# Altium footprint library UCP.PcbLib: 222 footprints (part 6 of 14)
Each footprint in its own frame and in the unit in brackets; x right, y up, seen from the top. Pads: shape width x height; smd on the part's side, far side on the other; paste and mask are expansions set on the pad; w line width, h text height; cw(c..) or ccw(c..) is an arc to the next point about the centre after c.
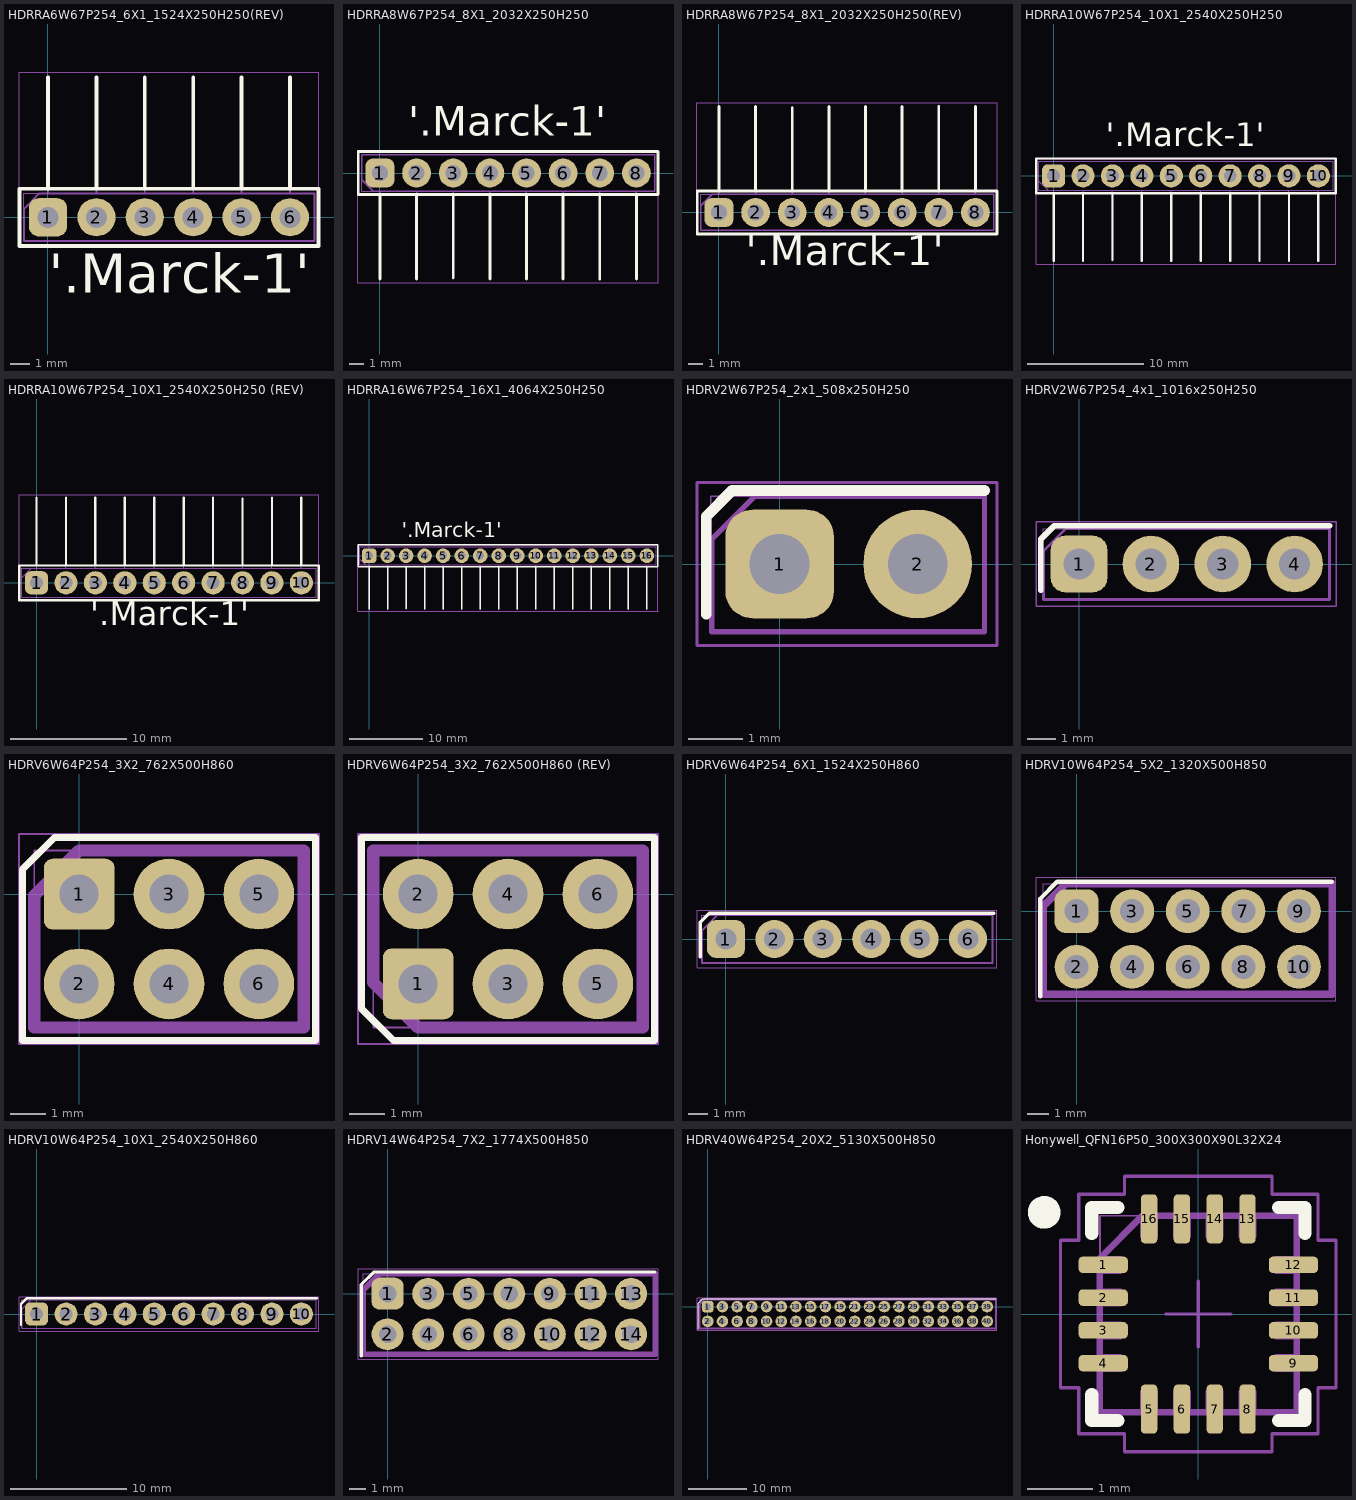
[diagram p5: the footprints below, top view; thin cyan lines are the x and y axes]

## HDRRA6W67P254_6X1_1524X250H250(REV) [mm] "Header, Right Angle Post, 2.54 mm pitch; 0.67 mm lead width, 6 pins, 1 row, 6 pins per row, 15.24 mm L X 2.50 mm W X 2.50 mm H body"
height 2.5
pads (6):
  rrect50% 2x2 hole 1.1: 1(0,0)
  round 2 hole 1.1: 2(2.54,0) 3(5.08,0) 4(7.62,0) 5(10.16,0) 6(12.7,0)
Top Overlay:
  lines w0.2: 0,1.55 0,7.35 ; 2.54,1.55 2.54,7.35 ; 5.08,1.55 5.08,7.35 ; 7.62,1.55 7.62,7.35 ; 10.16,1.55 10.16,7.35 ; 12.7,1.55 12.7,7.35 ; -1.5,-1.5 -1.5,1.5 14.2,1.5 14.2,-1.5 -1.5,-1.5
  text "'.Marck-1'" at 0.038,-4.651 h3.5
Top Designator:
  text ".Designator" at -4.511,-0.453 h2
Top Assembly:
  drawing of 17 lines, arcs and shapes, not listed
Top Courtyard:
  circle w0.05: c0,0 r0.25
  lines w0.05: -0.35,0 0.35,0 ; 0,-0.35 0,0.35 ; -1.52,-1.5 14.22,-1.5 14.22,7.62 -1.52,7.62 -1.52,-1.5
Top Component Outline:
  lines w0.025: -1.27,-1.25 13.97,-1.25 13.97,1.25 -1.27,1.25 -1.27,-1.25
Top Component Terminal:
  lines w0.025: -0.335,-0.335 0.335,-0.335 0.335,0.335 -0.335,0.335 -0.335,-0.335 ; 2.205,-0.335 2.875,-0.335 2.875,0.335 2.205,0.335 2.205,-0.335 ; 4.745,-0.335 5.415,-0.335 5.415,0.335 4.745,0.335 4.745,-0.335
3D body "HDRRA3W67P254_3X1_762X250H250_CF.step": height 5.45, standoff -3, extent 6.35,-1.27 13.97,7.35
3D body "HDRRA3W67P254_3X1_762X250H250_CF.step": height 5.45, standoff -3, extent -1.27,-1.27 6.35,7.35

## HDRRA8W67P254_8X1_2032X250H250 [mm] "Header, Right Angle Post, 2.54 mm pitch; 0.67 mm lead width, 10 pins, 1 row, 10 pins per row, 20.32mm L X 2.50 mm W X 2.50 mm H body"
height 2.5
pads (8):
  rrect50% 2x2 hole 1.1: 1(0,0)
  round 2 hole 1.1: 2(2.54,0) 3(5.08,0) 4(7.62,0) 5(10.16,0) 6(12.7,0) 7(15.24,0) 8(17.78,0)
Top Overlay:
  lines w0.2: 0,-7.35 0,-1.52 ; 2.54,-7.35 2.54,-1.5 ; 5.08,-7.25 5.08,-1.55 ; 7.62,-7.35 7.62,-1.55 ; 10.16,-7.35 10.16,-1.55 ; 12.7,-7.35 12.7,-1.55 ; 15.24,-7.35 15.24,-1.55 ; 17.78,-7.35 17.78,-1.55 ; -1.5,-1.5 -1.5,1.5 19.28,1.5 19.28,-1.5 -1.5,-1.5
  text "'.Marck-1'" at 1.958,1.904 h3.5
Top Designator:
  text ".Designator" at -4.511,-0.453 h2
Top Assembly:
  lines w0.1: 0,-7.35 0,-1.25 ; 2.54,-7.35 2.54,-1.25 ; 5.08,-7.35 5.08,-1.25 ; 7.62,-7.35 7.62,-1.25 ; 10.16,-7.35 10.16,-1.25 ; 12.7,-7.35 12.7,-1.25 ; 15.24,-7.35 15.24,-1.25 ; 17.78,-7.35 17.78,-1.25 ; -1.27,-0.455 -0.475,-1.25 19.05,-1.25 19.05,1.25 -1.27,1.25 -1.27,-0.455
Top Courtyard:
  circle w0.05: c0,0 r0.25
  lines w0.05: -0.35,0 0.35,0 ; 0,-0.35 0,0.35 ; -1.52,-7.62 -1.52,1.5 19.28,1.5 19.28,-7.62 -1.52,-7.62
Top Component Outline:
  lines w0.025: -1.27,-1.25 -1.27,1.25 19.05,1.25 19.05,-1.25 -1.27,-1.25
Top Component Terminal:
  lines w0.025: -0.335,-0.335 -0.335,0.335 0.335,0.335 0.335,-0.335 -0.335,-0.335 ; 2.205,-0.335 2.205,0.335 2.875,0.335 2.875,-0.335 2.205,-0.335 ; 4.745,-0.335 4.745,0.335 5.415,0.335 5.415,-0.335 4.745,-0.335 ; 7.285,-0.335 7.285,0.335 7.955,0.335 7.955,-0.335 7.285,-0.335 ; 9.825,-0.335 9.825,0.335 10.495,0.335 10.495,-0.335 9.825,-0.335 ; 12.365,-0.335 12.365,0.335 13.035,0.335 13.035,-0.335 12.365,-0.335 ; 14.905,-0.335 14.905,0.335 15.575,0.335 15.575,-0.335 14.905,-0.335 ; 17.445,-0.335 17.445,0.335 18.115,0.335 18.115,-0.335 17.445,-0.335
3D body "HDRRA8W64P254_8X1_2032X127H250.stp": height 5.45, standoff -3, extent -1.27,-7.37 19.05,1.25

## HDRRA8W67P254_8X1_2032X250H250(REV) [mm] "Header, Right Angle Post, 2.54 mm pitch; 0.67 mm lead width, 10 pins, 1 row, 10 pins per row, 20.32mm L X 2.50 mm W X 2.50 mm H body"
height 2.5
pads (8):
  rrect50% 2x2 hole 1.1: 1(0,0)
  round 2 hole 1.1: 2(2.54,0) 3(5.08,0) 4(7.62,0) 5(10.16,0) 6(12.7,0) 7(15.24,0) 8(17.78,0)
Top Overlay:
  lines w0.2: 0,1.52 0,7.35 ; 2.54,1.5 2.54,7.35 ; 5.08,1.55 5.08,7.25 ; 7.62,1.55 7.62,7.35 ; 10.16,1.55 10.16,7.35 ; 12.7,1.55 12.7,7.35 ; 15.24,1.55 15.24,7.35 ; 17.78,1.55 17.78,7.35 ; -1.5,-1.5 -1.5,1.5 19.28,1.5 19.28,-1.5 -1.5,-1.5
  text "'.Marck-1'" at 1.868,-4.366 h3.5
Top Designator:
  text ".Designator" at -4.511,-0.453 h2
Top Assembly:
  lines w0.1: 0,1.25 0,7.35 ; 2.54,1.25 2.54,7.35 ; 5.08,1.25 5.08,7.35 ; 7.62,1.25 7.62,7.35 ; 10.16,1.25 10.16,7.35 ; 12.7,1.25 12.7,7.35 ; 15.24,1.25 15.24,7.35 ; 17.78,1.25 17.78,7.35 ; -1.27,-1.25 -1.27,0.455 -0.475,1.25 19.05,1.25 19.05,-1.25 -1.27,-1.25
Top Courtyard:
  circle w0.05: c0,0 r0.25
  lines w0.05: -0.35,0 0.35,0 ; 0,-0.35 0,0.35 ; -1.52,-1.5 -1.52,7.62 19.28,7.62 19.28,-1.5 -1.52,-1.5
Top Component Outline:
  lines w0.025: -1.27,-1.25 19.05,-1.25 19.05,1.25 -1.27,1.25 -1.27,-1.25
Top Component Terminal:
  lines w0.025: -0.335,-0.335 0.335,-0.335 0.335,0.335 -0.335,0.335 -0.335,-0.335 ; 2.205,-0.335 2.875,-0.335 2.875,0.335 2.205,0.335 2.205,-0.335 ; 4.745,-0.335 5.415,-0.335 5.415,0.335 4.745,0.335 4.745,-0.335 ; 7.285,-0.335 7.955,-0.335 7.955,0.335 7.285,0.335 7.285,-0.335 ; 9.825,-0.335 10.495,-0.335 10.495,0.335 9.825,0.335 9.825,-0.335 ; 12.365,-0.335 13.035,-0.335 13.035,0.335 12.365,0.335 12.365,-0.335 ; 14.905,-0.335 15.575,-0.335 15.575,0.335 14.905,0.335 14.905,-0.335 ; 17.445,-0.335 18.115,-0.335 18.115,0.335 17.445,0.335 17.445,-0.335
3D body "HDRRA8W64P254_8X1_2032X127H250.stp": height 5.45, standoff -3, extent -1.27,-1.25 19.05,7.37

## HDRRA10W67P254_10X1_2540X250H250 [mm] "Header, Right Angle Post, 2.54 mm pitch; 0.67 mm lead width, 10 pins, 1 row, 10 pins per row, 25.4 mm L X 2.50 mm W X 2.50 mm H body"
height 2.5
pads (10):
  rrect50% 2x2 hole 1.1: 1(0,0)
  round 2 hole 1.1: 2(2.54,0) 3(5.08,0) 4(7.62,0) 5(10.16,0) 6(12.7,0) 7(15.24,0) 8(17.78,0) 9(20.32,0) 10(22.86,0)
Top Overlay:
  lines w0.2: 0,-7.35 0,-1.52 ; 2.54,-7.35 2.54,-1.5 ; 5.08,-7.25 5.08,-1.55 ; 7.62,-7.35 7.62,-1.55 ; 10.16,-7.35 10.16,-1.55 ; 12.7,-7.35 12.7,-1.55 ; 15.24,-7.35 15.24,-1.55 ; 17.78,-7.35 17.78,-1.55 ; 20.32,-7.35 20.32,-1.55 ; 22.86,-7.35 22.86,-1.55 ; -1.5,-1.5 24.36,-1.5 24.36,1.5 -1.5,1.5 -1.5,-1.5
  text "'.Marck-1'" at 4.513,1.854 h3.5
Top Designator:
  text ".Designator" at -4.511,-0.453 h2
Top Assembly:
  drawing of 25 lines, arcs and shapes, not listed
Top Courtyard:
  circle w0.05: c0,0 r0.25
  lines w0.05: -0.35,0 0.35,0 ; 0,-0.35 0,0.35 ; -1.52,-7.62 24.38,-7.62 24.38,1.5 -1.52,1.5 -1.52,-7.62
Top Component Outline:
  lines w0.025: -1.27,-1.25 24.13,-1.25 24.13,1.25 -1.27,1.25 -1.27,-1.25
Top Component Terminal:
  lines w0.025: -0.335,-0.335 0.335,-0.335 0.335,0.335 -0.335,0.335 -0.335,-0.335 ; 2.205,-0.335 2.875,-0.335 2.875,0.335 2.205,0.335 2.205,-0.335 ; 4.745,-0.335 5.415,-0.335 5.415,0.335 4.745,0.335 4.745,-0.335 ; 7.285,-0.335 7.955,-0.335 7.955,0.335 7.285,0.335 7.285,-0.335 ; 9.825,-0.335 10.495,-0.335 10.495,0.335 9.825,0.335 9.825,-0.335 ; 12.365,-0.335 13.035,-0.335 13.035,0.335 12.365,0.335 12.365,-0.335 ; 14.905,-0.335 15.575,-0.335 15.575,0.335 14.905,0.335 14.905,-0.335 ; 17.445,-0.335 18.115,-0.335 18.115,0.335 17.445,0.335 17.445,-0.335 ; 19.985,-0.335 20.655,-0.335 20.655,0.335 19.985,0.335 19.985,-0.335 ; 22.525,-0.335 23.195,-0.335 23.195,0.335 22.525,0.335 22.525,-0.335
3D body "DS1022-1x10R.stp": height 5.45, standoff -3, extent -1.27,-7.35 24.13,1.27

## HDRRA10W67P254_10X1_2540X250H250 (REV) [mm] "Header, Right Angle Post, 2.54 mm pitch; 0.67 mm lead width, 10 pins, 1 row, 10 pins per row, 25.4 mm L X 2.50 mm W X 2.50 mm H body"
height 2.5
pads (10):
  rrect50% 2x2 hole 1.1: 1(0,0)
  round 2 hole 1.1: 2(2.54,0) 3(5.08,0) 4(7.62,0) 5(10.16,0) 6(12.7,0) 7(15.24,0) 8(17.78,0) 9(20.32,0) 10(22.86,0)
Top Overlay:
  lines w0.2: 0,1.55 0,7.35 ; 2.54,1.55 2.54,7.35 ; 5.08,1.55 5.08,7.35 ; 7.62,1.55 7.62,7.35 ; 10.16,1.55 10.16,7.35 ; 12.7,1.55 12.7,7.35 ; 15.24,1.55 15.24,7.35 ; 17.78,1.55 17.78,7.25 ; 20.32,1.5 20.32,7.35 ; 22.86,1.52 22.86,7.35 ; -1.5,-1.5 24.36,-1.5 24.36,1.5 -1.5,1.5 -1.5,-1.5
  text "'.Marck-1'" at 4.638,-4.346 h3.5
Top Designator:
  text ".Designator" at -4.511,-0.453 h2
Top Assembly:
  drawing of 25 lines, arcs and shapes, not listed
Top Courtyard:
  circle w0.05: c0,0 r0.25
  lines w0.05: -0.35,0 0.35,0 ; 0,-0.35 0,0.35 ; -1.516,-1.525 -1.516,7.595 24.384,7.595 24.384,-1.525 -1.516,-1.525
Top Component Outline:
  lines w0.025: -1.27,-1.25 24.13,-1.25 24.13,1.25 -1.27,1.25 -1.27,-1.25
Top Component Terminal:
  lines w0.025: -0.335,-0.335 0.335,-0.335 0.335,0.335 -0.335,0.335 -0.335,-0.335 ; 2.205,-0.335 2.875,-0.335 2.875,0.335 2.205,0.335 2.205,-0.335 ; 4.745,-0.335 5.415,-0.335 5.415,0.335 4.745,0.335 4.745,-0.335 ; 7.285,-0.335 7.955,-0.335 7.955,0.335 7.285,0.335 7.285,-0.335 ; 9.825,-0.335 10.495,-0.335 10.495,0.335 9.825,0.335 9.825,-0.335 ; 12.365,-0.335 13.035,-0.335 13.035,0.335 12.365,0.335 12.365,-0.335 ; 14.905,-0.335 15.575,-0.335 15.575,0.335 14.905,0.335 14.905,-0.335 ; 17.445,-0.335 18.115,-0.335 18.115,0.335 17.445,0.335 17.445,-0.335 ; 19.985,-0.335 20.655,-0.335 20.655,0.335 19.985,0.335 19.985,-0.335 ; 22.525,-0.335 23.195,-0.335 23.195,0.335 22.525,0.335 22.525,-0.335
3D body "DS1022-1x10R.stp": height 5.45, standoff -3, extent -1.27,-1.27 24.13,7.35

## HDRRA16W67P254_16X1_4064X250H250 [mm] "Header, Right Angle Post, 2.54 mm pitch; 0.67 mm lead width, 16 pins, 1 row, 16 pins per row, 40.64 mm L X 2.50 mm W X 2.50 mm H body"
height 2.5
pads (16):
  rrect50% 2x2 hole 1.1: 1(0,0)
  round 2 hole 1.1: 2(2.54,0) 3(5.08,0) 4(7.62,0) 5(10.16,0) 6(12.7,0) 7(15.24,0) 8(17.78,0) 9(20.32,0) 10(22.86,0) 11(25.4,0) 12(27.94,0) 13(30.48,0) 14(33.02,0) 15(35.56,0) 16(38.1,0)
Top Overlay:
  lines w0.2: 0,-7.35 0,-1.52 ; 2.54,-7.35 2.54,-1.5 ; 5.08,-7.25 5.08,-1.55 ; 7.62,-7.35 7.62,-1.55 ; 10.16,-7.35 10.16,-1.55 ; 12.7,-7.35 12.7,-1.55 ; 15.24,-7.35 15.24,-1.55 ; 17.78,-7.35 17.78,-1.55 ; 20.32,-7.35 20.32,-1.55 ; 22.86,-7.35 22.86,-1.55 ; 25.4,-7.35 25.4,-1.55 ; 27.94,-7.35 27.94,-1.55 ; 30.48,-7.35 30.48,-1.55 ; 33.02,-7.35 33.02,-1.55 ; 35.56,-7.35 35.56,-1.55 ; 38.1,-7.35 38.1,-1.55 ; -1.5,-1.5 -1.5,1.5 39.6,1.5 39.6,-1.5 -1.5,-1.5
  text "'.Marck-1'" at 4.513,1.854 h3.5
Top Designator:
  text ".Designator" at -4.511,-0.453 h2
Top Assembly:
  lines w0.1: 0,-7.35 0,-1.25 ; 2.54,-7.35 2.54,-1.25 ; 5.08,-7.35 5.08,-1.25 ; 7.62,-7.35 7.62,-1.25 ; 10.16,-7.35 10.16,-1.25 ; 12.7,-7.35 12.7,-1.25 ; 15.24,-7.35 15.24,-1.25 ; 17.78,-7.35 17.78,-1.25 ; 20.32,-7.35 20.32,-1.25 ; 22.86,-7.35 22.86,-1.25 ; 25.4,-7.35 25.4,-1.25 ; 27.94,-7.35 27.94,-1.25 ; 30.48,-7.35 30.48,-1.25 ; 33.02,-7.35 33.02,-1.25 ; 35.56,-7.35 35.56,-1.25 ; 38.1,-7.35 38.1,-1.25 ; 39.37,-1.25 39.37,1.25 -1.27,1.25 -1.27,-0.455 -0.475,-1.25 39.375,-1.25
Top Courtyard:
  circle w0.05: c0,0 r0.25
  lines w0.05: -0.35,0 0.35,0 ; 0,-0.35 0,0.35 ; 39.62,-7.62 39.62,1.5 -1.52,1.5 -1.52,-7.62 39.625,-7.62
Top Component Outline:
  lines w0.025: 24.13,-1.25 -1.27,-1.25 -1.27,1.25 24.13,1.25 ; 39.37,-1.25 39.37,1.25
Top Component Terminal:
  lines w0.025: -0.335,-0.335 -0.335,0.335 0.335,0.335 0.335,-0.335 -0.335,-0.335 ; 2.205,-0.335 2.205,0.335 2.875,0.335 2.875,-0.335 2.205,-0.335 ; 4.745,-0.335 4.745,0.335 5.415,0.335 5.415,-0.335 4.745,-0.335 ; 7.285,-0.335 7.285,0.335 7.955,0.335 7.955,-0.335 7.285,-0.335 ; 9.825,-0.335 9.825,0.335 10.495,0.335 10.495,-0.335 9.825,-0.335 ; 12.365,-0.335 12.365,0.335 13.035,0.335 13.035,-0.335 12.365,-0.335 ; 14.905,-0.335 14.905,0.335 15.575,0.335 15.575,-0.335 14.905,-0.335 ; 17.445,-0.335 17.445,0.335 18.115,0.335 18.115,-0.335 17.445,-0.335 ; 19.985,-0.335 19.985,0.335 20.655,0.335 20.655,-0.335 19.985,-0.335 ; 22.525,-0.335 22.525,0.335 23.195,0.335 23.195,-0.335 22.525,-0.335
3D body "HDRRA16W64P254_16X1_4064X250H250.STEP.stp": height 5.45, standoff -3, extent -1.27,-7.35 39.37,1.27

## HDRV2W67P254_2x1_508x250H250 [mm] "Header, Vertical, 2.54 mm pitch; 0.64 mm lead width, 2 pins, 1 row, 2 pins per row, 5.08 mm L X 2.50 mm W X 8.60 mm H body"
height 8.6
pads (2):
  rrect50% 2x2 hole 1.1 paste-1.65: 1(0,0)
  round 2 hole 1.1 paste-1.65: 2(2.54,0)
Top Overlay:
  lines w0.2: -1.35,-0.925 -1.35,0.875 -0.875,1.35 3.77,1.35
Top Designator:
  text ".Designator" at -4.511,-0.453 h2
Top Assembly:
  lines w0.1: -1.25,-1.25 -1.25,0.455 -0.455,1.25 3.77,1.25 3.77,-1.25 -1.25,-1.25
Top Courtyard:
  circle w0.05: c0,0 r0.25
  lines w0.05: -0.35,0 0.35,0 ; 0,-0.35 0,0.35 ; -1.52,-1.5 -1.52,1.5 4,1.5 4,-1.5 -1.52,-1.5
Top Component Outline:
  lines w0.025: -1.27,-1.25 -1.27,1.25 3.77,1.25 3.77,-1.25 -1.27,-1.25
Top Component Terminal:
  lines w0.025: -0.32,-0.32 -0.32,0.32 0.32,0.32 0.32,-0.32 -0.32,-0.32 ; 2.22,-0.32 2.22,0.32 2.86,0.32 2.86,-0.32 2.22,-0.32
3D body "HDRV2W64P254_2X1_508X254H860.STEP": height 8.6, standoff -3, extent -1.25,-1.25 3.79,1.25

## HDRV2W67P254_4x1_1016x250H250 [mm] "Header, Vertical, 2.54 mm pitch; 0.64 mm lead width, 4 pins, 1 row, 4 pins per row, 10.16 mm L X 2.50 mm W X 8.60 mm H body"
height 8.6
pads (4):
  rrect50% 2x2 hole 1.1 paste-1.65: 1(0,0)
  round 2 hole 1.1 paste-1.65: 2(2.54,0) 3(5.08,0) 4(7.62,0)
Top Overlay:
  lines w0.2: -1.35,-0.925 -1.35,0.875 -0.875,1.35 8.85,1.35
Top Designator:
  text ".Designator" at -4.511,-0.453 h2
Top Assembly:
  lines w0.1: -1.25,-1.25 -1.25,0.455 -0.455,1.25 8.85,1.25 8.85,-1.25 -1.25,-1.25
Top Courtyard:
  circle w0.05: c0,0 r0.25
  lines w0.05: -0.35,0 0.35,0 ; 0,-0.35 0,0.35 ; -1.52,-1.5 -1.52,1.5 9.08,1.5 9.08,-1.5 -1.52,-1.5
Top Component Outline:
  lines w0.025: -1.27,-1.25 -1.27,1.25 8.85,1.25 8.85,-1.25 -1.27,-1.25
Top Component Terminal:
  lines w0.025: -0.32,-0.32 -0.32,0.32 0.32,0.32 0.32,-0.32 -0.32,-0.32 ; 2.22,-0.32 2.22,0.32 2.86,0.32 2.86,-0.32 2.22,-0.32 ; 4.76,-0.32 4.76,0.32 5.4,0.32 5.4,-0.32 4.76,-0.32 ; 7.3,-0.32 7.3,0.32 7.94,0.32 7.94,-0.32 7.3,-0.32
3D body "HDRV4W64P254_4X1_1016X254H860.STEP.stp": height 8.6, standoff -3, extent -1.25,-1.25 8.87,1.25

## HDRV6W64P254_3X2_762X500H860 [mm] "Header, Vertical, 2.54 mm pitch; 0.64 mm lead width, 6 pins, 2 rows, 3 pins per row, 7.62 mm L X 5.00 mm W X 8.60 mm H body"
height 8.6
pads (6):
  rrect25% 2x2 hole 1.1 paste-2: 1(0,0)
  round 2 hole 1.1 paste-2: 2(0,-2.54) 3(2.54,0) 4(2.54,-2.54) 5(5.08,0) 6(5.08,-2.54)
Top Overlay:
  lines w0.2: -1.6,-4.14 -1.6,0.7 -0.7,1.6 6.68,1.6 6.68,-4.14 -1.6,-4.14
Top Designator:
  text ".Designator" at -4.511,-0.453 h2
Top Assembly:
  lines w0.35: -1.27,-3.77 6.35,-3.77 6.35,1.23 0,1.23 -1.27,-0.04 -1.27,-3.77
Top Courtyard:
  circle w0.05: c0,0 r0.25
  lines w0.05: -0.35,0 0.35,0 ; 0,-0.35 0,0.35 ; -1.7,-4.24 6.78,-4.24 6.78,1.7 -1.7,1.7 -1.7,-4.24
Top Component Outline:
  lines w0.05: -1.27,-3.77 6.35,-3.77 6.35,1.23 -1.27,1.23 -1.27,-3.77
Top Component Terminal:
  lines w0.05: -0.32,-2.86 0.32,-2.86 0.32,-2.22 -0.32,-2.22 -0.32,-2.86 ; -0.32,-0.32 0.32,-0.32 0.32,0.32 -0.32,0.32 -0.32,-0.32 ; 2.22,-2.86 2.86,-2.86 2.86,-2.22 2.22,-2.22 2.22,-2.86 ; 2.22,-0.32 2.86,-0.32 2.86,0.32 2.22,0.32 2.22,-0.32 ; 4.76,-2.86 5.4,-2.86 5.4,-2.22 4.76,-2.22 4.76,-2.86 ; 4.76,-0.32 5.4,-0.32 5.4,0.32 4.76,0.32 4.76,-0.32
3D body "HDRV6W64P254_3X2_762X500H860.stp": height 8.54, standoff -3, extent -1.27,-3.81 6.35,1.27

## HDRV6W64P254_3X2_762X500H860 (REV) [mm] "Header, Vertical, 2.54 mm pitch; 0.64 mm lead width, 6 pins, 2 rows, 3 pins per row, 7.62 mm L X 5.00 mm W X 8.60 mm H body"
height 8.6
pads (6):
  rrect25% 2x2 hole 1.1 paste-2: 1(0,-2.54)
  round 2 hole 1.1 paste-2: 2(0,0) 3(2.54,-2.54) 4(2.54,0) 5(5.08,-2.54) 6(5.08,0)
Top Overlay:
  lines w0.2: -1.6,-3.24 -0.7,-4.14 6.68,-4.14 6.68,1.6 -1.6,1.6 -1.6,-3.24
Top Designator:
  text ".Designator" at -4.511,-0.453 h2
Top Assembly:
  lines w0.35: -1.27,-2.5 -1.27,1.23 6.35,1.23 6.35,-3.77 0,-3.77 -1.27,-2.5
Top Courtyard:
  circle w0.05: c0,0 r0.25
  lines w0.05: -0.35,0 0.35,0 ; 0,-0.35 0,0.35 ; -1.7,-4.24 6.78,-4.24 6.78,1.7 -1.7,1.7 -1.7,-4.24
Top Component Outline:
  lines w0.05: -1.27,-3.77 6.35,-3.77 6.35,1.23 -1.27,1.23 -1.27,-3.77
Top Component Terminal:
  lines w0.05: -0.32,-2.86 0.32,-2.86 0.32,-2.22 -0.32,-2.22 -0.32,-2.86 ; -0.32,-0.32 0.32,-0.32 0.32,0.32 -0.32,0.32 -0.32,-0.32 ; 2.22,-2.86 2.86,-2.86 2.86,-2.22 2.22,-2.22 2.22,-2.86 ; 2.22,-0.32 2.86,-0.32 2.86,0.32 2.22,0.32 2.22,-0.32 ; 4.76,-2.86 5.4,-2.86 5.4,-2.22 4.76,-2.22 4.76,-2.86 ; 4.76,-0.32 5.4,-0.32 5.4,0.32 4.76,0.32 4.76,-0.32
3D body "HDRV6W64P254_3X2_762X500H860.stp": height 8.54, standoff -3, extent -1.27,-3.81 6.35,1.27

## HDRV6W64P254_6X1_1524X250H860 [mm] "Header, Vertical, 2.54 mm pitch; 0.64 mm lead width, 6 pins, 1 row, 6 pins per row, 15.24 mm L X 2.50 mm W X 8.60 mm H body"
height 8.6
pads (6):
  rrect50% 2x2 hole 1.1 paste-1.65: 1(0,0)
  round 2 hole 1.1 paste-1.65: 2(2.54,0) 3(5.08,0) 4(7.62,0) 5(10.16,0) 6(12.7,0)
Top Overlay:
  lines w0.2: -1.35,-0.925 -1.35,0.875 -0.875,1.35 14.05,1.35
Top Designator:
  text ".Designator" at 0,0 h1.2
Top Assembly:
  lines w0.1: -1.25,-1.25 -1.25,0.455 -0.455,1.25 13.99,1.25 13.99,-1.25 -1.25,-1.25
Top Courtyard:
  circle w0.05: c0,0 r0.25
  lines w0.05: -0.35,0 0.35,0 ; 0,-0.35 0,0.35 ; -1.52,-1.5 -1.52,1.5 14.22,1.5 14.22,-1.5 -1.52,-1.5
Top Component Outline:
  lines w0.025: -1.27,-1.25 -1.27,1.25 13.97,1.25 13.97,-1.25 -1.27,-1.25
Top Component Terminal:
  lines w0.025: -0.32,-0.32 -0.32,0.32 0.32,0.32 0.32,-0.32 -0.32,-0.32 ; 2.22,-0.32 2.22,0.32 2.86,0.32 2.86,-0.32 2.22,-0.32 ; 4.76,-0.32 4.76,0.32 5.4,0.32 5.4,-0.32 4.76,-0.32 ; 7.3,-0.32 7.3,0.32 7.94,0.32 7.94,-0.32 7.3,-0.32 ; 9.84,-0.32 9.84,0.32 10.48,0.32 10.48,-0.32 9.84,-0.32 ; 12.38,-0.32 12.38,0.32 13.02,0.32 13.02,-0.32 12.38,-0.32
3D body "HDRV6W64P254_6X1_1524X250H860.STEP": height 8.6, standoff -3, extent -1.25,-1.25 13.95,1.25

## HDRV10W64P254_5X2_1320X500H850 [mm] "Header, Vertical Receptacle, 2.54 mm pitch; 0.64 mm lead width, 10 pins, 2 row, 5 pins per row, 13.20 mm L X 5.00 mm W X 8.50 mm H body"
height 8.5
pads (10):
  rrect50% 2x2 hole 1.1 paste-1.65: 1(0,0)
  round 2 hole 1.1 paste-1.65: 2(0,-2.54) 3(2.54,0) 4(2.54,-2.54) 5(5.08,0) 6(5.08,-2.54) 7(7.62,0) 8(7.62,-2.54) 9(10.16,0) 10(10.16,-2.54)
Top Overlay:
  lines w0.2: -1.65,-3.89 -1.65,0.575 -0.875,1.35 11.65,1.35
Top Designator:
  text ".Designator" at -4.511,-0.453 h2
Top Assembly:
  lines w0.35: -1.52,-3.79 -1.52,0.23 -0.5,1.25 11.68,1.25 11.68,-3.79 -1.52,-3.79
Top Courtyard:
  lines w0.05: -0.35,0 0.35,0 ; 0,-0.35 0,0.35 ; -1.85,-4.09 -1.85,1.55 11.85,1.55 11.85,-4.09 -1.85,-4.09
Top Component Outline:
  lines w0.025: -1.52,-3.79 -1.25,-3.79 11.68,-3.79 11.68,1.25 -1.25,1.25 -1.52,1.25 -1.52,-0.28 -1.52,-3.79
Top Component Terminal:
  lines w0.025: -0.3,-2.74 0.3,-2.74 0.3,-2.34 -0.3,-2.34 -0.3,-2.74 ; -0.3,-0.2 0.3,-0.2 0.3,0.2 -0.3,0.2 -0.3,-0.2 ; 2.24,-2.74 2.84,-2.74 2.84,-2.34 2.24,-2.34 2.24,-2.74 ; 2.24,-0.2 2.84,-0.2 2.84,0.2 2.24,0.2 2.24,-0.2 ; 4.78,-2.74 5.38,-2.74 5.38,-2.34 4.78,-2.34 4.78,-2.74 ; 4.78,-0.2 5.38,-0.2 5.38,0.2 4.78,0.2 4.78,-0.2 ; 7.32,-2.74 7.92,-2.74 7.92,-2.34 7.32,-2.34 7.32,-2.74 ; 7.32,-0.2 7.92,-0.2 7.92,0.2 7.32,0.2 7.32,-0.2 ; 9.86,-2.74 10.46,-2.74 10.46,-2.34 9.86,-2.34 9.86,-2.74 ; 9.86,-0.2 10.46,-0.2 10.46,0.2 9.86,0.2 9.86,-0.2
3D body "HDRV10W64P254_5X2_1320X500H850.stp": height 8.6, standoff -3, extent -1.25,-3.79 11.41,1.25

## HDRV10W64P254_10X1_2540X250H860 [mm] "Header, Vertical, 2.54 mm pitch; 0.64 mm lead width, 6 pins, 1 row, 6 pins per row, 25.4 mm L X 2.50 mm W X 8.60 mm H body"
height 8.6
pads (10):
  rrect50% 2x2 hole 1.1 paste-1.65: 1(0,0)
  round 2 hole 1.1 paste-1.65: 2(2.54,0) 3(5.08,0) 4(7.62,0) 5(10.16,0) 6(12.7,0) 7(15.24,0) 8(17.78,0) 9(20.32,0) 10(22.86,0)
Top Overlay:
  lines w0.2: -1.35,-0.925 -1.35,0.875 -0.875,1.35 24.21,1.35
Top Designator:
  text ".Designator" at 0,0 h1.2
Top Assembly:
  lines w0.1: -1.25,-1.25 -1.25,0.455 -0.455,1.25 24.15,1.25 24.15,-1.25 -1.25,-1.25
Top Courtyard:
  circle w0.05: c0,0 r0.25
  lines w0.05: -0.35,0 0.35,0 ; 0,-0.35 0,0.35 ; -1.52,-1.5 -1.52,1.5 24.38,1.5 24.38,-1.5 -1.52,-1.5
Top Component Outline:
  lines w0.025: -1.27,-1.25 -1.27,1.25 24.13,1.25 24.13,-1.25 -1.27,-1.25
Top Component Terminal:
  lines w0.025: -0.32,-0.32 -0.32,0.32 0.32,0.32 0.32,-0.32 -0.32,-0.32 ; 2.22,-0.32 2.22,0.32 2.86,0.32 2.86,-0.32 2.22,-0.32 ; 4.76,-0.32 4.76,0.32 5.4,0.32 5.4,-0.32 4.76,-0.32 ; 7.3,-0.32 7.3,0.32 7.94,0.32 7.94,-0.32 7.3,-0.32 ; 9.84,-0.32 9.84,0.32 10.48,0.32 10.48,-0.32 9.84,-0.32 ; 12.38,-0.32 12.38,0.32 13.02,0.32 13.02,-0.32 12.38,-0.32 ; 14.92,-0.32 14.92,0.32 15.56,0.32 15.56,-0.32 14.92,-0.32 ; 17.46,-0.32 17.46,0.32 18.1,0.32 18.1,-0.32 17.46,-0.32 ; 20,-0.32 20,0.32 20.64,0.32 20.64,-0.32 20,-0.32 ; 22.54,-0.32 22.54,0.32 23.18,0.32 23.18,-0.32 22.54,-0.32
3D body "DS1021-1x10SF11-B.stp": height 8.6, standoff -3, extent -1.27,-1.25 24.09,1.25

## HDRV14W64P254_7X2_1774X500H850 [mm] "Header, Vertical Receptacle, 2.54 mm pitch; 0.64 mm lead width, 14 pins, 2 row, 7 pins per row, 17.74 mm L X 5.00 mm W X 8.50 mm H body"
height 8.5
pads (14):
  rrect50% 2x2 hole 1.1 paste-1.65: 1(0,0)
  round 2 hole 1.1 paste-1.65: 2(0,-2.54) 3(2.54,0) 4(2.54,-2.54) 5(5.08,0) 6(5.08,-2.54) 7(7.62,0) 8(7.62,-2.54) 9(10.16,0) 10(10.16,-2.54) 11(12.7,0) 12(12.7,-2.54) 13(15.24,0) 14(15.24,-2.54)
Top Overlay:
  lines w0.2: -1.65,-3.89 -1.65,0.575 -0.875,1.35 16.73,1.35
Top Designator:
  text ".Designator" at -4.511,-0.453 h2
Top Assembly:
  lines w0.35: -1.52,-3.79 16.76,-3.79 16.76,1.25 -0.5,1.25 -1.52,0.23 -1.52,-3.79
Top Courtyard:
  lines w0.05: -0.35,0 0.35,0 ; 0,-0.35 0,0.35 ; -1.85,-4.09 16.93,-4.09 16.93,1.55 -1.85,1.55 -1.85,-4.09
Top Component Outline:
  lines w0.025: -1.52,-3.79 -1.52,-0.28 -1.52,1.25 -1.25,1.25 16.76,1.25 16.76,-3.79 -1.25,-3.79 -1.52,-3.79
Top Component Terminal:
  lines w0.025: -0.3,-2.74 -0.3,-2.34 0.3,-2.34 0.3,-2.74 -0.3,-2.74 ; -0.3,-0.2 -0.3,0.2 0.3,0.2 0.3,-0.2 -0.3,-0.2 ; 2.24,-2.74 2.24,-2.34 2.84,-2.34 2.84,-2.74 2.24,-2.74 ; 2.24,-0.2 2.24,0.2 2.84,0.2 2.84,-0.2 2.24,-0.2 ; 4.78,-2.74 4.78,-2.34 5.38,-2.34 5.38,-2.74 4.78,-2.74 ; 4.78,-0.2 4.78,0.2 5.38,0.2 5.38,-0.2 4.78,-0.2 ; 7.32,-2.74 7.32,-2.34 7.92,-2.34 7.92,-2.74 7.32,-2.74 ; 7.32,-0.2 7.32,0.2 7.92,0.2 7.92,-0.2 7.32,-0.2 ; 9.86,-2.74 9.86,-2.34 10.46,-2.34 10.46,-2.74 9.86,-2.74 ; 9.86,-0.2 9.86,0.2 10.46,0.2 10.46,-0.2 9.86,-0.2 ; 12.4,-2.74 12.4,-2.34 13,-2.34 13,-2.74 12.4,-2.74 ; 12.4,-0.2 12.4,0.2 13,0.2 13,-0.2 12.4,-0.2 ; 14.94,-2.74 14.94,-2.34 15.54,-2.34 15.54,-2.74 14.94,-2.74 ; 14.94,-0.2 14.94,0.2 15.54,0.2 15.54,-0.2 14.94,-0.2
3D body "HDRV14W64P254_7X2_1774X500H850.stp": height 8.6, standoff -3, extent -1.25,-3.79 16.49,1.25

## HDRV40W64P254_20X2_5130X500H850 [mm] "Header, Vertical Receptacle, 2.54 mm pitch; 0.64 mm lead width, 40 pins, 2 row, 20 pins per row, 51.30 mm L X 5.00 mm W X 8.50 mm H body"
height 8.5
pads (40):
  rrect50% 2x2 hole 1.1 paste-1.65: 1(0,0)
  round 2 hole 1.1 paste-1.65: 2(0,-2.54) 3(2.54,0) 4(2.54,-2.54) 5(5.08,0) 6(5.08,-2.54) 7(7.62,0) 8(7.62,-2.54) 9(10.16,0) 10(10.16,-2.54) 11(12.7,0) 12(12.7,-2.54) 13(15.24,0) 14(15.24,-2.54) 15(17.78,0) 16(17.78,-2.54) 17(20.32,0) 18(20.32,-2.54) 19(22.86,0) 20(22.86,-2.54) 21(25.4,0) 22(25.4,-2.54) 23(27.94,0) 24(27.94,-2.54) 25(30.48,0) 26(30.48,-2.54) 27(33.02,0) 28(33.02,-2.54) 29(35.56,0) 30(35.56,-2.54) 31(38.1,0) 32(38.1,-2.54) 33(40.64,0) 34(40.64,-2.54) 35(43.18,0) 36(43.18,-2.54) 37(45.72,0) 38(45.72,-2.54) 39(48.26,0) 40(48.26,-2.54)
Top Overlay:
  lines w0.2: -1.65,-3.89 -1.65,0.575 -0.875,1.35 49.75,1.35
Top Designator:
  text ".Designator" at -4.511,-0.453 h2
Top Assembly:
  lines w0.35: 49.78,1.25 49.78,-3.79 -1.52,-3.79 -1.52,0.23 -0.5,1.25 49.788,1.25
Top Courtyard:
  lines w0.05: -0.35,0 0.35,0 ; 0,-0.35 0,0.35 ; -1.85,-4.09 49.95,-4.09 49.95,1.55 -1.85,1.55 -1.85,-4.09
Top Component Outline:
  lines w0.025: 49.78,1.21 49.78,-3.79 -1.25,-3.79 -1.25,1.25 49.78,1.25
Top Component Terminal:
  drawing of 160 lines, arcs and shapes, not listed
3D body "HDRV40W60P254_20X2_5130X500H850.stp": height 8.6, standoff -3, extent -1.25,-3.79 49.51,1.25

## Honywell_QFN16P50_300X300X90L32X24 [mm] "Quad Flat No-Lead (QFN), 0.50 mm pitch;  square, 4 pin X 4 pin, 3.00 mm L X 3.00 mm W X 0.90 mm H body"
height 0.9
pads (16):
  rrect50% 0.75x0.25 smd mask+0.05: 1(-1.45,0.75) 2(-1.45,0.25) 3(-1.45,-0.25) 4(-1.45,-0.75) 9(1.45,-0.75) 10(1.45,-0.25) 11(1.45,0.25) 12(1.45,0.75)
  rrect50% 0.25x0.75 smd mask+0.05: 5(-0.75,-1.45) 6(-0.25,-1.45) 7(0.25,-1.45) 8(0.75,-1.45) 13(0.75,1.45) 14(0.25,1.45) 15(-0.25,1.45) 16(-0.75,1.45)
Top Overlay:
  circle w0.25: c-2.35,1.55 r0.125
  lines w0.2: -1.625,-1.225 -1.625,-1.625 -1.225,-1.625 ; -1.625,1.225 -1.625,1.625 -1.225,1.625 ; 1.225,-1.625 1.625,-1.625 1.625,-1.225 ; 1.225,1.625 1.625,1.625 1.625,1.225
Top Assembly:
  lines w0.1: -1.5,-1.5 -1.5,0.85 -0.85,1.5 1.5,1.5 1.5,-1.5 -1.5,-1.5
Top Courtyard:
  lines w0.05: -0.5,0 0.5,0 ; 0,-0.5 0,0.5 ; -2.1,-1.125 -2.1,1.125 -1.825,1.125 -1.825,1.825 -1.125,1.825 -1.125,2.1 1.125,2.1 1.125,1.825 1.825,1.825 1.825,1.125 2.1,1.125 2.1,-1.125 1.825,-1.125 1.825,-1.825 1.125,-1.825 1.125,-2.1 -1.125,-2.1 -1.125,-1.825 -1.825,-1.825 -1.825,-1.125 -2.1,-1.125
Top Component Outline:
  lines w0.025: -1.5,-1.5 -1.5,1.5 1.5,1.5 1.5,-1.5 -1.5,-1.5
Top Component Terminal:
  lines w0.025: -1.5,-0.875 -1.175,-0.875 -1.175,-0.625 -1.5,-0.625 -1.5,-0.875 ; -1.5,-0.375 -1.175,-0.375 -1.175,-0.125 -1.5,-0.125 -1.5,-0.375 ; -1.5,0.125 -1.175,0.125 -1.175,0.375 -1.5,0.375 -1.5,0.125 ; -1.5,0.625 -1.175,0.625 -1.175,0.875 -1.5,0.875 -1.5,0.625 ; -0.875,-1.5 -0.875,-1.175 -0.625,-1.175 -0.625,-1.5 -0.875,-1.5 ; -0.875,1.175 -0.875,1.5 -0.625,1.5 -0.625,1.175 -0.875,1.175 ; -0.375,-1.5 -0.375,-1.175 -0.125,-1.175 -0.125,-1.5 -0.375,-1.5 ; -0.375,1.175 -0.375,1.5 -0.125,1.5 -0.125,1.175 -0.375,1.175 ; 0.125,-1.5 0.125,-1.175 0.375,-1.175 0.375,-1.5 0.125,-1.5 ; 0.125,1.175 0.125,1.5 0.375,1.5 0.375,1.175 0.125,1.175 ; 0.625,-1.5 0.625,-1.175 0.875,-1.175 0.875,-1.5 0.625,-1.5 ; 0.625,1.175 0.625,1.5 0.875,1.5 0.875,1.175 0.625,1.175 ; 1.175,-0.875 1.175,-0.625 1.5,-0.625 1.5,-0.875 1.175,-0.875 ; 1.175,-0.375 1.175,-0.125 1.5,-0.125 1.5,-0.375 1.175,-0.375 ; 1.175,0.125 1.175,0.375 1.5,0.375 1.5,0.125 1.175,0.125 ; 1.175,0.625 1.175,0.875 1.5,0.875 1.5,0.625 1.175,0.625
3D body "Honywell_QFN16P50_300X300X90L32X24.stp": height 0.9, standoff 0, extent -1.5,-1.5 1.5,1.5